# Altium footprint library SamacSys.PcbLib: 88 footprints (part 6 of 6)
Each footprint in its own frame and in the unit in brackets; x right, y up, seen from the top. Pads: shape width x height; smd on the part's side, far side on the other; paste and mask are expansions set on the pad; w line width, h text height; cw(c..) or ccw(c..) is an arc to the next point about the centre after c.
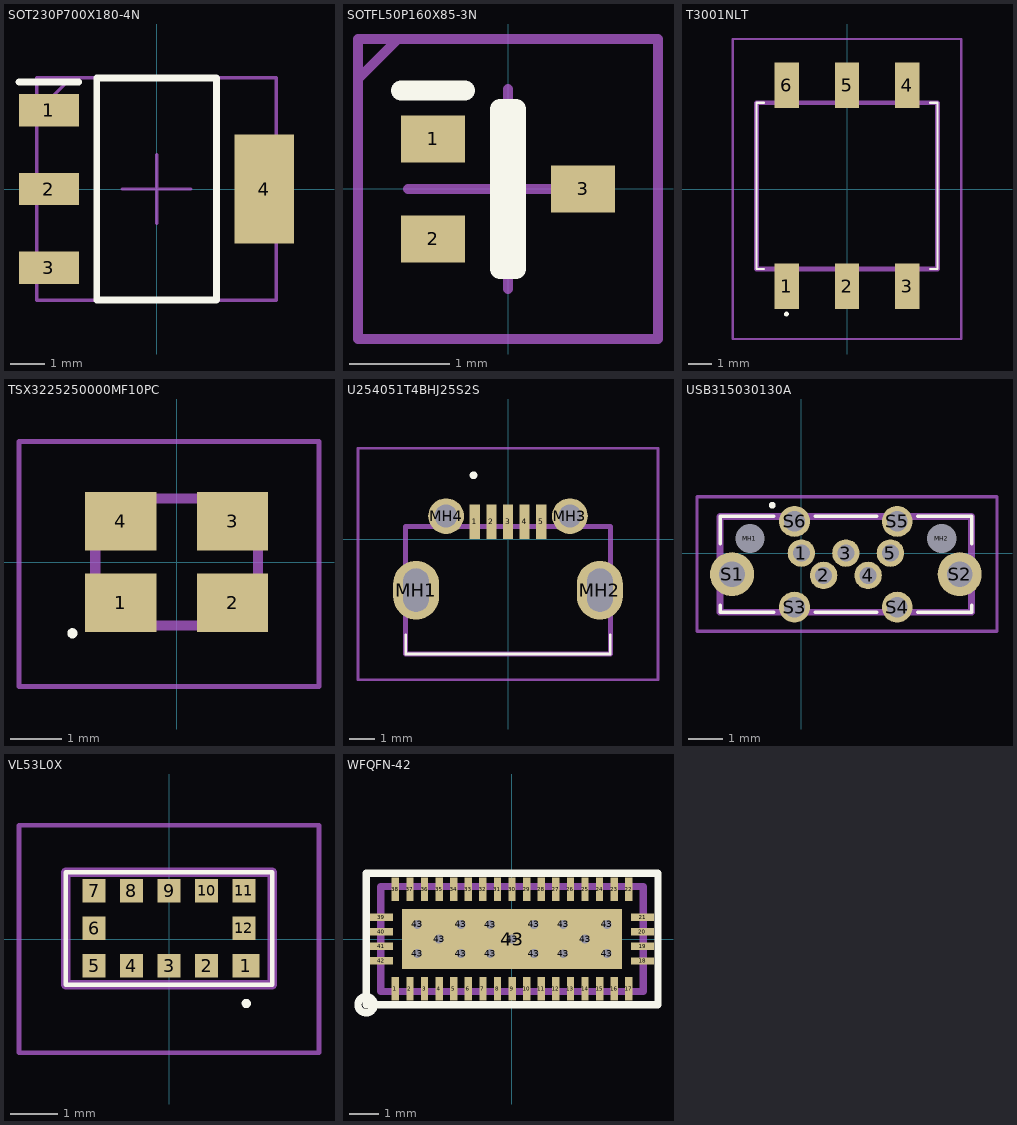
[diagram p5: the footprints below, top view; thin cyan lines are the x and y axes]

## SOT230P700X180-4N [mm]
pads (4):
  rect 1.75x0.95 smd: 1(-3.15,2.3) 2(-3.15,0) 3(-3.15,-2.3)
  rect 1.75x3.2 smd: 4(3.15,0)
Top Overlay:
  lines w0.2: -4.025,3.125 -2.275,3.125 ; -1.75,-3.25 -1.75,3.25 1.75,3.25 1.75,-3.25 -1.75,-3.25
Top Component Outline:
  lines w0.1: -3.5,2.25 -2.5,3.25 ; -3.5,-3.25 3.5,-3.25 3.5,3.25 -3.5,3.25 -3.5,-3.25
Top Component Center:
  lines w0.1: -1,0 1,0 ; 0,-1 0,1
Top Value:
  text "'.Comment'" at -2.476,-0.342 h1.14
Top Designator:
  text "'.Designator'" at -3.648,-0.496 h1.27
3D body "LM317DCYR.stp": height 1.8, standoff 0, extent -3.5,-3.25 3.5,3.25

## SOTFL50P160X85-3N [mm]
pads (3):
  rect 0.64x0.47 smd: 1(-0.75,0.5) 2(-0.75,-0.5) 3(0.75,0)
Top Overlay:
  lines w0.2: -1.07,0.985 -0.43,0.985 ; -0.08,-0.8 0.08,-0.8 0.08,0.8 -0.08,0.8 -0.08,-0.8
Top Component Outline:
  lines w0.1: -1.5,1.1 -1.1,1.5 ; -1.5,-1.5 1.5,-1.5 1.5,1.5 -1.5,1.5 -1.5,-1.5
Top Component Center:
  lines w0.1: -1,0 1,0 ; 0,-1 0,1
Top Value:
  text "'.Comment'" at -2.476,-0.342 h1.14
Top Designator:
  text "'.Designator'" at -3.648,-0.496 h1.27
3D body "DTC043ZEBTL.stp": height 0.85, standoff 0, extent -0.8,-0.8 0.8,0.8

## T3001NLT [mm]
pads (6):
  rect 1.02x1.91 smd: 1(-2.54,-4.098) 2(0,-4.098) 3(2.54,-4.098) 4(2.54,4.363) 5(0,4.363) 6(-2.54,4.363)
Top Overlay:
  lines w0.1: -3.5,-3.367 -3.81,-3.367 -3.81,3.633 -3.5,3.633 ; -2.501,-5.268 cw(c-2.551,-5.268) -2.6,-5.268 cw(c-2.549,-5.268) -2.499,-5.268 ; 3.5,-3.367 3.81,-3.367 3.81,3.633 3.5,3.633
Body Extra:
  lines w0.2: -3.81,-3.367 3.81,-3.367 3.81,3.633 -3.81,3.633 -3.81,-3.367
Bottom Courtyard:
  lines w0.1: -4.81,-6.318 4.81,-6.318 4.81,6.318 -4.81,6.318 -4.81,-6.318
  text ".Designator" at -1.016,-0.254 h1.52
3D body "T3001NLT.stp": height 6.1, standoff 0, extent -3.81,-4.951 3.81,5.216

## TSX3225250000MF10PC [mm]
pads (4):
  rect 1.4x1.15 smd: 1(-1.1,-0.8) 2(1.1,-0.8) 3(1.1,0.8) 4(-1.1,0.8)
Top Overlay:
  lines w0.1: -2.1,-1.4 cw(c-2.05,-1.4) -2,-1.4 cw(c-2.05,-1.4) -2.1,-1.4
Top Component Outline:
  lines w0.2: -1.6,-1.25 1.6,-1.25 1.6,1.25 -1.6,1.25 -1.6,-1.25
Top Courtyard:
  lines w0.1: -3.1,-2.45 2.8,-2.45 2.8,2.375 -3.1,2.375 -3.1,-2.45
3D body "TSX-3225_25.0000MF10P-C.stp": height 0.7, standoff 0, extent -1.685,-1.26 1.685,1.26

## U254051T4BHJ25S2S [mm]
pads (9):
  rect 0.4x1.35 smd: 1(-1.3,0.675) 2(-0.65,0.675) 3(0,0.675) 4(0.65,0.675) 5(1.3,0.675)
  oval 1.8x2.3 hole 1.7 slot 1 at 0 deg: MH1(-3.6,-2) MH2(3.6,-2)
  round 1.4 hole 0.9: MH3(2.425,0.9) MH4(-2.425,0.9)
Top Overlay:
  lines w0.1: -4,-4.5 4,-4.5 ; -4,-4.5 4,-4.5 ; -4,-4.5 -4,-3.75 -4,-4.5 ; 4,-4.5 4,-3.75 4,-4.5
  lines w0.2: -1.4,2.5 ccw(c-1.35,2.5) -1.3,2.5 ; -1.4,2.5 cw(c-1.35,2.5) -1.3,2.5 ; -1.4,2.5 ccw(c-1.35,2.5) -1.3,2.5
Body Extra:
  lines w0.2: -4.01,-4.5 4.01,-4.5 4.01,0.5 -4.01,0.5 -4.01,-4.5
Bottom Courtyard:
  lines w0.1: -5.875,-5.5 5.875,-5.5 5.875,3.55 -5.875,3.55 -5.875,-5.5
3D body "USB-MICRO_B.STEP": height 2.8, standoff -0.95, extent -4.001,-4.5 4.001,1.1

## USB315030130A [mm]
pads (13):
  round 0.8 hole 0.5: 1(0,0) 2(0.65,-0.65) 3(1.3,0) 4(1.95,-0.65) 5(2.6,0)
  round 0.425 hole 0.85 unplated: MH1(-1.5,0.425) MH2(4.1,0.425)
  round 1.286 hole 0.75: S1(-2.025,-0.615) S2(4.625,-0.615)
  round 0.9 hole 0.6: S3(-0.2,-1.575) S4(2.8,-1.575) S5(2.8,0.925) S6(-0.2,0.925)
Top Overlay:
  lines w0.1: -2.375,-1.525 -2.375,-1.725 -0.8,-1.725 ; -2.375,0.275 -2.375,1.075 -0.8,1.075 ; 0.4,-1.725 2.2,-1.725 ; 0.4,1.075 2.2,1.075 ; 3.4,-1.725 4.975,-1.725 4.975,-1.525 ; 3.4,1.075 4.975,1.075 4.975,0.275 ; -0.9,1.4 cw(c-0.85,1.4) -0.8,1.4 cw(c-0.85,1.4) -0.9,1.4
Body Extra:
  lines w0.2: -2.375,-1.725 4.975,-1.725 4.975,1.075 -2.375,1.075 -2.375,-1.725
Bottom Courtyard:
  lines w0.1: -3.048,-2.286 5.715,-2.286 5.715,1.651 -3.048,1.651 -3.048,-2.286
  text ".Designator" at -0.508,-0.508 h1.52
3D body "USB3150-30-130-A.stp": height 7.33, standoff -5, extent -2.375,-1.775 4.975,1.125

## VL53L0X [mm]
pads (12):
  rect 0.58x0.5 smd: 1(1.64,-0.575)
  rect 0.5x0.5 smd: 2(0.8,-0.575) 3(0,-0.575) 4(-0.8,-0.575) 5(-1.6,-0.575) 6(-1.6,0.225) 7(-1.6,1.025) 8(-0.8,1.025) 9(0,1.025) 10(0.8,1.025) 11(1.6,1.025) 12(1.6,0.225)
Top Overlay:
  lines w0.1: -2.2,-0.975 2.2,-0.975 2.2,1.425 -2.2,1.425 -2.2,-0.975 ; 1.6,-1.375 cw(c1.65,-1.375) 1.7,-1.375 cw(c1.65,-1.375) 1.6,-1.375
Body Extra:
  lines w0.2: -2.2,-0.975 2.2,-0.975 2.2,1.425 -2.2,1.425 -2.2,-0.975
Bottom Courtyard:
  lines w0.1: -3.2,-2.425 3.2,-2.425 3.2,2.425 -3.2,2.425 -3.2,-2.425
  text "'.VersionControl_RevNumber'" at -0.254,-0.127 h7
3D body "VL53L0X.stp": height 1.1, standoff 0, extent -2.2,-0.975 2.2,1.425

## WFQFN-42 [mm]
pads (58):
  rect 0.25x0.8 smd: 1(-3.996,-1.7) 2(-3.495,-1.7) 3(-2.996,-1.7) 4(-2.495,-1.7) 5(-1.996,-1.7) 6(-1.495,-1.7) 7(-0.996,-1.7) 8(-0.495,-1.7) 9(0.004,-1.7) 10(0.504,-1.7) 11(1.004,-1.7) 12(1.505,-1.7) 13(2.004,-1.7) 14(2.505,-1.7) 15(3.004,-1.7) 16(3.505,-1.7) 17(4.004,-1.7) 22(4.002,1.7) 23(3.503,1.7) 24(3.002,1.7) 25(2.502,1.7) 26(2.002,1.7) 27(1.503,1.7) 28(1.002,1.7) 29(0.503,1.7) 30(0.002,1.7) 31(-0.497,1.7) 32(-0.998,1.7) 33(-1.497,1.7) 34(-1.998,1.7) 35(-2.497,1.7) 36(-2.998,1.7) 37(-3.497,1.7) 38(-3.998,1.7)
  rect 0.8x0.25 smd: 18(4.473,-0.752) 19(4.473,-0.251) 20(4.472,0.248) 21(4.473,0.749) 39(-4.473,0.75) 40(-4.473,0.25) 41(-4.473,-0.25) 42(-4.473,-0.75)
  round 0.5 hole 0.3: 43(-3.248,-0.5) 43(-3.248,0.5) 43(-2.497,0) 43(-1.748,-0.5) 43(-1.748,0.5) 43(-0.748,-0.5) 43(-0.745,0.494) 43(0.002,0) 43(0.752,-0.5) 43(0.752,0.5) 43(1.755,-0.502) 43(1.755,0.498) 43(2.503,0) 43(3.252,-0.5) 43(3.252,0.5)
  rect 7.55x2.05 smd: 43(0.002,0)
Top Overlay:
  circle w0.254: c-4.998,-2.25 r0.279
  lines w0.254: -4.999,-2.25 5.001,-2.25 ; -4.999,2.25 -4.998,-2.25 ; -4.998,2.25 5.002,2.25 ; 5.002,-2.25 5.004,2.25
Top Component Outline:
  lines w0.254: -4.5,-1.8 4.5,-1.8 4.5,1.8 -4.5,1.8 -4.5,-1.8
Top Component Center:
  lines w0.254: -0.6,0 0.6,0 ; 0,-0.5 0,0.6
Top Value:
  text "'.Comment'" at -3.3,-0.289 h1.52
Top Designator:
  text "'.Designator'" at -4.3,-0.234 h1.52
3D body "RUA0042A.stp": height 0.8, standoff 0, extent -4.5,-1.75 4.5,1.75